# Altium schematic symbol library OFS-CUSTOM.SchLib: 2 symbols
Pins are listed as number, name and electrical type; pins without a type are passive.

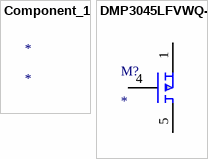
[diagram p0: symbols Component_1 to DMP3045LFVWQ-7]

## Component_1
designator *

## DMP3045LFVWQ-7
designator M?
P-channel MOSFET 30V 5.7A, PowerDI3333-8 (pins 1-3 S, 4 G, 5-8 + pad D)
footprint PowerDI3333-8_PMOS
pins: 1 S, 4 G, 5 D